# EAGLE library part QPL9504TR7 (library QPL9504TR7)
Ultra Low Noise, Flat Gain LNA Source: Datasheet <https://www.qorvo.com/products/d/da007934>
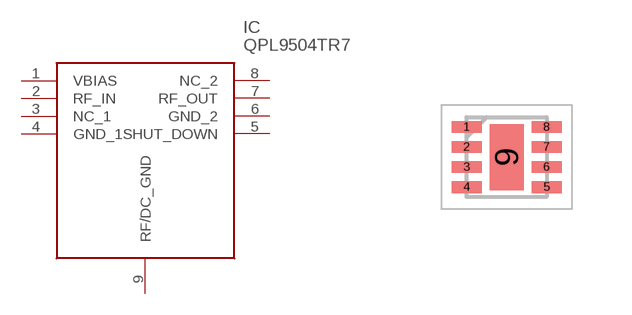
[diagram p0: symbol with the pads of SON50P200X200X90-9N; footprint SON50P200X200X90-9N]

Designator prefix IC

## QPL9504TR7 (Description: Ultra Low Noise, Flat Gain LNA; Height: 0.9mm; Manufacturer_Name: Qorvo; Manufacturer_Part_Number: QPL9504TR7; Mouser_Part_Number: 772-QPL9504TR7; Mouser_Price-Stock: https://www.mouser.co.uk/ProductDetail/Qorvo/QPL9504TR7?qs=iLbezkQI%252BsiSWi8SJWi3jA%3D%3D)  [SON50P200X200X90-9N]
1  VBIAS
2  RF_IN
3  NC_1
4  GND_1
5  SHUT_DOWN
6  GND_2
7  RF_OUT
8  NC_2
9  RF/DC_GND

## Footprint SON50P200X200X90-9N (pad centres in mm)
DFN_8-2022
smd 0.75 x 0.3: 1 -1,0.75; 2 -1,0.25; 3 -1,-0.25; 4 -1,-0.75; 5 1,-0.75; 6 1,-0.25; 7 1,0.25; 8 1,0.75
smd 0.85 x 1.65: 9 0,0